# Altium schematic symbol library MC33269D-3.3G.SchLib: 1 symbol
Pins are listed as number, name and electrical type; pins without a type are passive.

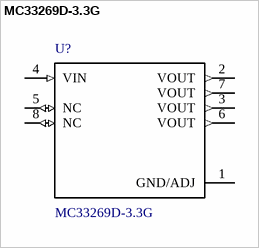
[diagram p0: symbol MC33269D-3.3G]

## MC33269D-3.3G
designator U?
SnapEDA_Link: https://www.snapeda.com/parts/MC33269D-3.3G/Onsemi/view-part/?ref=snap; Check_prices: https://www.snapeda.com/parts/MC33269D-3.3G/Onsemi/view-part/?ref=eda; Value: *
footprint *SOIC127P600X175-8N
pins: 1 GND/ADJ (power), 2 VOUT (out), 3 VOUT (out), 4 VIN (in), 5 NC (io), 6 VOUT (out), 7 VOUT (out), 8 NC (io)